# Altium integrated library PTS645SM43SMTR92LFS.IntLib: 1 symbol
Pins are listed as number, name and electrical type; pins without a type are passive.

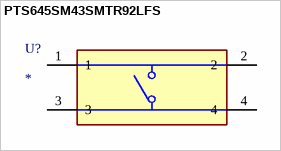
[diagram p0: symbol PTS645SM43SMTR92LFS]

## PTS645SM43SMTR92LFS
designator U?
Tactile Switch SPST-NO Top Actuated Surface Mount; MF: C&K; MP: PTS645SM43SMTR92LFS; SnapEDA_Link: https://www.snapeda.com/parts/PTS645SM43SMTR92LFS/C%2526K/view-part/?ref=snap; Package: NON-STANDARD-4 C&amp;K; Value: *; Check_prices: https://www.snapeda.com/parts/PTS645SM43SMTR92LFS/C%2526K/view-part/?ref=eda
footprint SWITCH_43SMTR92LFS
pins: 1, 2, 3, 4